# Altium footprint library TPD2EUSB30DRTR.PcbLib: 1 footprints
Each footprint in its own frame and in the unit in brackets; x right, y up, seen from the top. Pads: shape width x height; smd on the part's side, far side on the other; paste and mask are expansions set on the pad; w line width, h text height; cw(c..) or ccw(c..) is an arc to the next point about the centre after c.
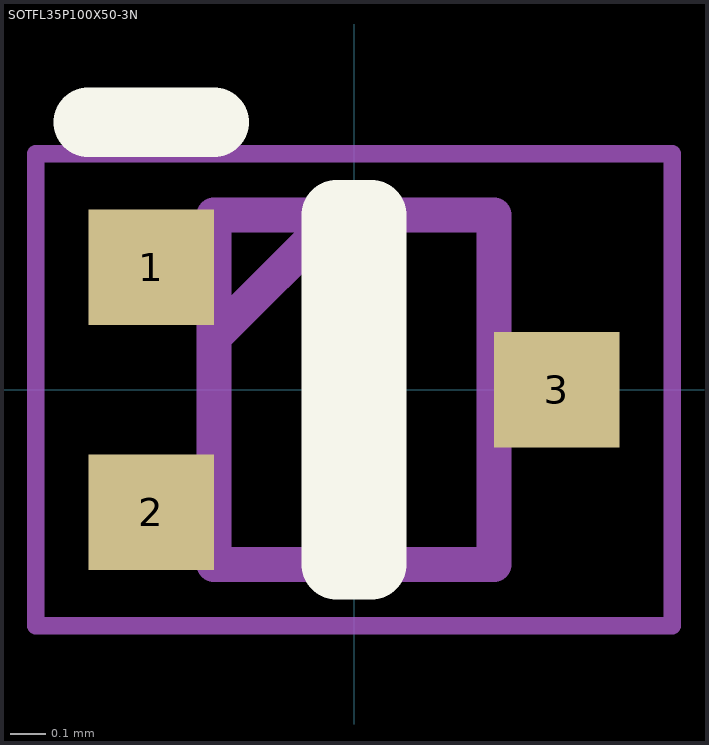
[diagram p0: the footprint, top view; thin cyan lines are the x and y axes]

## SOTFL35P100X50-3N [mm]
pads (3):
  rect 0.36x0.33 smd: 1(-0.58,0.35) 2(-0.58,-0.35) 3(0.58,0)
Top Overlay:
  lines w0.2: -0.76,0.765 -0.4,0.765 ; -0.05,-0.5 0.05,-0.5 0.05,0.5 -0.05,0.5 -0.05,-0.5
Mechanical 15:
  lines w0.1: -0.4,0.15 -0.05,0.5 ; -0.4,-0.5 0.4,-0.5 0.4,0.5 -0.4,0.5 -0.4,-0.5
Mechanical 20:
  lines w0.05: -0.91,-0.675 0.91,-0.675 0.91,0.675 -0.91,0.675 -0.91,-0.675